# Altium schematic symbol library IoT_SYNTHPATCH.SchLib: 40 symbols
Pins are listed as number, name and electrical type; pins without a type are passive.

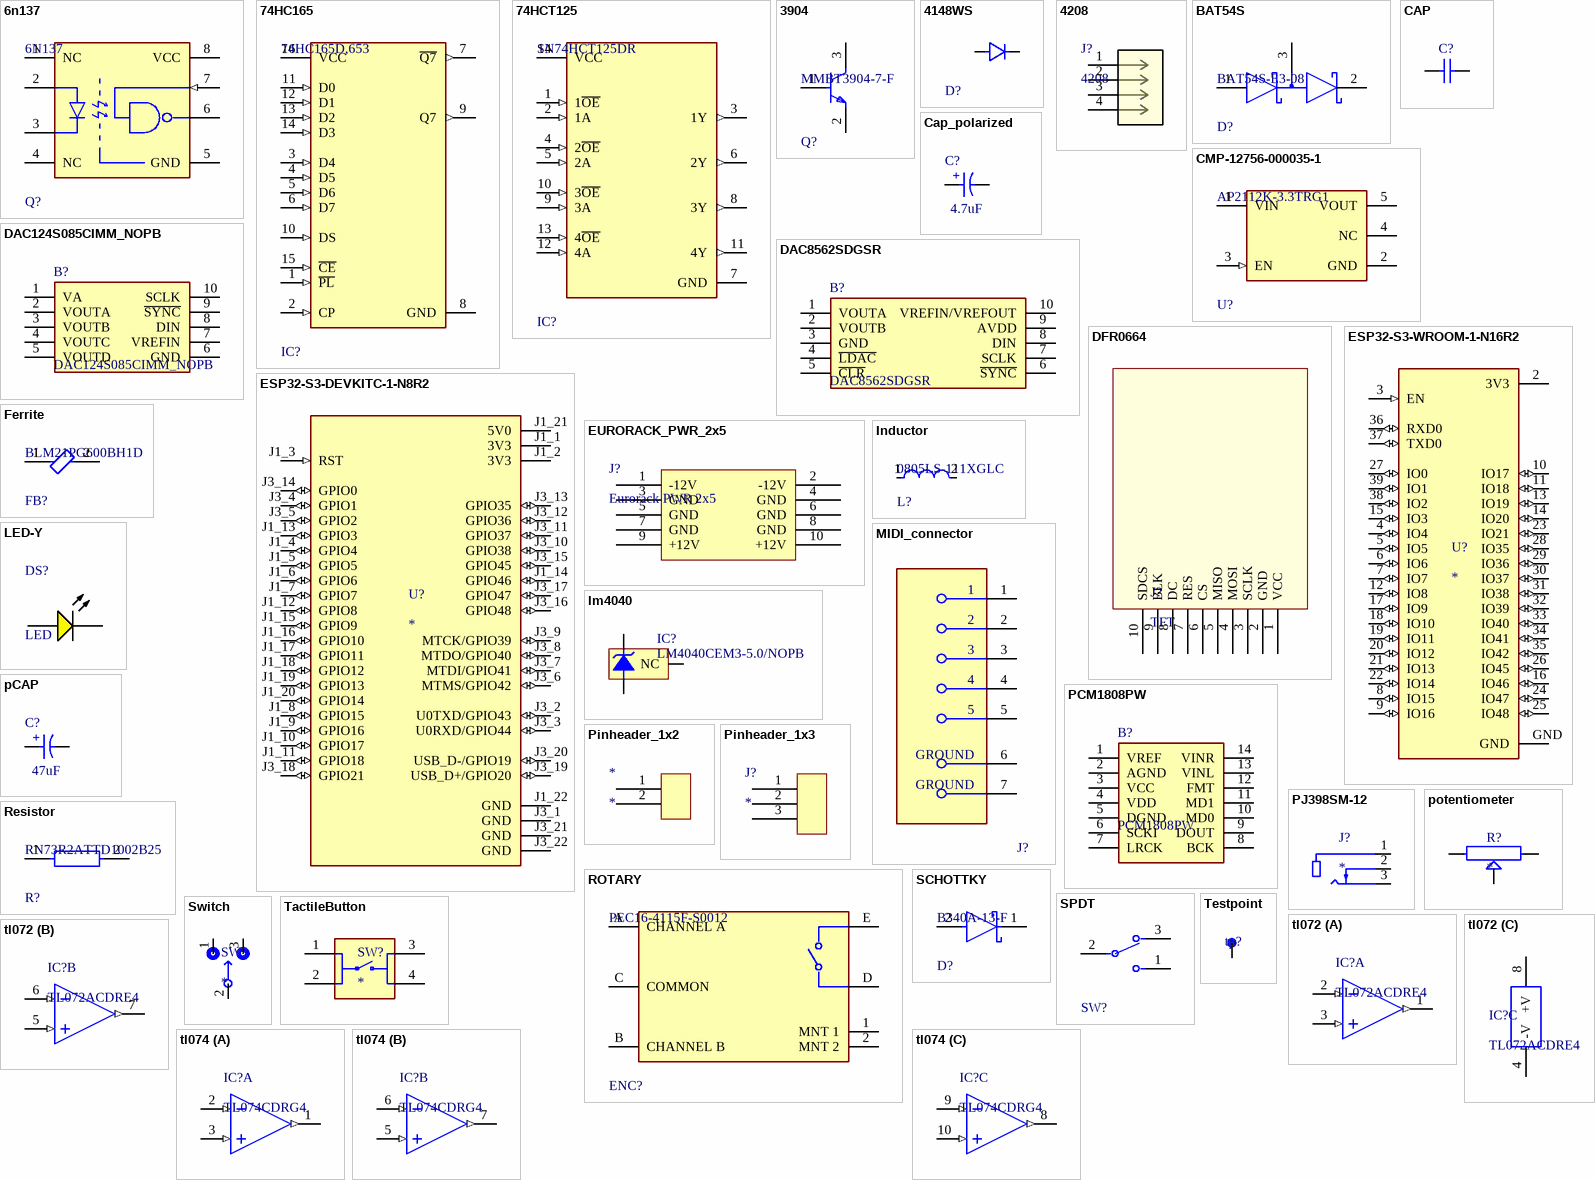
[diagram p0: symbols 6n137 to tl074]

## 6n137
designator Q?, comment 6N137
OPTOISO 3.75KV OPN COLL 8DIP GW; Manufacturer: Broadcom; Manufacturer Part Number: 6N137-300E; Min Supply Voltage: 4.5V; Forward Voltage: 1.5V; Turn Off Delay Time: 50ns; Standoff Height: 0.505mm; Reverse Voltage: 5V; Isolation Voltage: 3750Vrms; Forward Current: 10mA; Turn On Delay Time: 48ns; Max Supply Voltage: 5.5V; Package: 0; Automotive: No; Lead Free: Yes; ComponentLink2Description: Datasheet; Temperature: -40°C to +85°C; Device Class L3: unset; Height: 4.455mm; Ambient Temperature Range Low: -40°C; Digikey Description: OPTOISO 3.75KV OPN COLL 8DIP GW; Temperature Range Low: -40°C; ComponentLink2URL: https://docs.broadcom.com/docs/AV02-0940EN; Mouser Description: High Speed Optocouplers 10 Mb/s 3750Vrms; Category: Trans; Ambient Temperature Range High: +85°C; RoHS: TRUE; Octopart: https://octopart.com/6n137-300e-broadcom-71125550; Device Class L1: Optoelectronics; Device Class L2: Optocouplers; Temperature Range High: +85°C
footprint FP-6N137-300E-MFG
footprint 6n137
pins: 1 NC, 2 A, 3 C, 4 NC, 5 GND (power), 6 VO (oc), 7 VE (in), 8 VCC (power)

## 74HC165
designator IC?, comment 74HC165D,653
IC SHIFT REGST 8BIT PI-SO 16SOIC; Manufacturer: Nexperia; Standoff Height: 0.1mm; Number Of Inputs: 8; Logic Function Desc: Shift Register; Nominal Supply Current: 8uA; Number Of Circuits: 1; Propagation Delay: 15ns; Min Supply Voltage: 2V; Frequency: 61MHz; Max Supply Voltage: 6V; Height: 1.75mm; Digikey Description: IC SHIFT REGST 8BIT PI-SO 16SOIC; ComponentLink2URL: https://assets.nexperia.com/documents/data-sheet/74HC_HCT165.pdf; Ipc Land Pattern Name: SOP127P600X175-16; Temperature Range High: +125°C; Manufacturer Part Number: 74HC165D,653; Temperature: -40°C to +125°C; Device Class L2: Logic ICs; Device Class L1: Integrated Circuits (ICs); Lead Free: Yes; Number Of Outputs: 1; Ambient Temperature Range High: +125°C; ComponentLink2Description: Datasheet; Temperature Range Low: -40°C; Category: IC; RoHS: TRUE; Automotive: No; Device Class L3: Shift Registers; Octopart: https://octopart.com/74hc165d%2C653-nexperia-78737091; Footprint Url: https://assets.nexperia.com/documents/outline-drawing/SOT109-1.pdf; Ambient Temperature Range Low: -40°C; Package: SOT109-1
footprint FP-SOT109-1-MFG
footprint FP-SOT109-1-IPC_A
footprint FP-SOT109-1-IPC_C
footprint FP-SOT109-1-IPC_B
pins: 1 ~{PL} (in), 2 CP (in), 3 D4 (in), 4 D5 (in), 5 D6 (in), 6 D7 (in), 7 ~{Q7} (out), 8 GND (power), 9 Q7 (out), 10 DS (in), 11 D0 (in), 12 D1 (in), 13 D2 (in), 14 D3 (in), 15 ~{CE} (in), 16 VCC (power)

## 74HCT125
designator IC?, comment SN74HCT125DR
IC BUF NON-INVERT 5.5V 14SOIC; Number of Input Lines: 4; Polarity: Non-Inverting; Logic Function: Buffer; Low Level Output Current: 6mA; Operating Supply Voltage: 5V; Min Supply Voltage: 4.5V; Quiescent Current: 8uA; Propagation Delay: 50ns; Number of Bits per Element: 1; High Level Output Current: -6mA; Turn-On Delay Time: 36ns; Width: 3.91mm; Max Supply Voltage: 5.5V; Number of Circuits: 4; Max Operating Temperature: 85°C; Radiation Hardening: No; Number of Outputs: 4; Case/Package: SOIC; Length: 8.65mm; Number of Output Lines: 4; Number of Pins: 14; Package Quantity: 2500; Number of Inputs: 4; Mount: Surface Mount; Min Operating Temperature: -40°C; Number of Bits: 4; REACH SVHC: No SVHC; Height: 1.58mm; Contact Plating: Gold; Lead Free: Lead Free; Number of Channels: 4; Number of Elements: 4; Packaging: Tape and Reel; RoHS Compliant: Yes
footprint FP-D0014A-IPC_B
footprint FP-D0014A-IPC_C
footprint FP-D0014A-MFG
footprint FP-D0014A-IPC_A
pins: 1 1~{OE} (in), 2 1A (in), 3 1Y (out), 4 2~{OE} (in), 5 2A (in), 6 2Y (out), 7 GND (power), 8 3Y (out), 9 3A (in), 10 3~{OE} (in), 11 4Y (out), 12 4A (in), 13 4~{OE} (in), 14 VCC (power)

## 3904
designator Q?, comment MMBT3904-7-F
TRANS NPN 40V 0.2A SMD SOT23-3; Frequency: 300MHz; Power Dissipation: 350mW; Element Configuration: Single; Max Power Dissipation: 300mW; Max Collector Current: 200mA; Collector Emitter Saturation Voltage: 300mV; Number of Elements: 1; hFE Min: 100; Collector Base Voltage (VCBO): 60V; Emitter Base Voltage (VEBO): 6V; Contact Plating: Tin; Package Quantity: 3000; Max Frequency: 300MHz; REACH SVHC: No SVHC; Max Operating Temperature: 150°C; Width: 1.4mm; Collector Emitter Voltage (VCEO): 40V; Voltage Rating (DC): 40V; Radiation Hardening: No; Case/Package: SOT-23; Height: 1mm; Collector Emitter Breakdown Voltage: 40V; Length: 3.05mm; Polarity: NPN; Packaging: Tape and Reel; Number of Pins: 3; Min Operating Temperature: -55°C; Gain Bandwidth Product: 300MHz; Mount: Surface Mount; Weight: 0.000282oz; Continuous Collector Current: 200mA; Transition Frequency: 300MHz; Max Breakdown Voltage: 40V; Lead Free: Lead Free
footprint FP-SOT23-MFG
footprint FP-SOT23-IPC_B
footprint FP-SOT23-IPC_C
footprint 3904-SOT23
footprint 3904-SOT23
pins: 1 B, 2 E, 3 C

## 4148WS
designator D?, comment 1N4148WS  (value not drawn)
DIODE GEN PURP 75V 150MA SOD323F; Forward Voltage: 1V; Power Dissipation: 200mW; Element Configuration: Single; Max Forward Surge Current (Ifsm): 2A; Peak Reverse Current: 5uA; Recovery Time: 4ns; Package Quantity: 1; Number of Pins: 2; Height: 1mm; REACH SVHC: No SVHC; Max Reverse Voltage (DC): 75V; Forward Current: 150mA; Length: 1.8mm; Max Repetitive Reverse Voltage (Vrrm): 75V; Max Operating Temperature: 150°C; Average Rectified Current: 150mA; Contact Plating: Tin; Packaging: Tape and Reel; Radiation Hardening: No; Min Operating Temperature: -55°C; Width: 1.35mm; Weight: 0.0276g; Lead Free: Lead Free; Mount: Surface Mount; Reverse Voltage: 75V; Reverse Recovery Time: 4ns
footprint FP-477AB-IPC_A
footprint FP-477AB-IPC_B
footprint 4148
pins: 1 C, 2 A

## 4208
designator J?
Description; Manufacturer_Name: Adafruit Industries; Copyright: Copyright (C) 2025 Ultra Librarian. All rights reserved.; Manufacturer_Part_Number: 4208; RefDes: RefDes; Type: Type
footprint CONN_CCSH-W10R-04TR-BK-A_ADA
pins: 1, 2, 3, 4

## BAT54S
designator D?, comment BAT54S-E3-08
DIODE ARRAY SCHOTTKY 30V SOT23; Manufacturer: Vishay; Capacitance: 10pF; Forward Current: 200mA; Max Junction Temp: +125°C; Value: 10pF; Max Surge Forward Current: 600mA; Peak Reverse Current: 2uA; Temperature: -55°C to +125°C; Device Class L1: Discrete Semiconductors; Height: 1.15mm; ComponentLink2Description: Datasheet; Mouser Description: Schottky Diodes & Rectifiers 200mA 30 Volt; Max Repetitive Reverse Voltage: 30V; Manufacturer Part Number: BAT54S-E3-08; Package: 6.541-5014.01-4; Temperature Range High: +125°C; Digikey Description: DIODE ARRAY SCHOTTKY 30V SOT23; Device Class L2: Diodes; ComponentLink2URL: http://www.vishay.com/docs/85508/bat54.pdf; RoHS: TRUE; Octopart: https://octopart.com/bat54s-e3-08-vishay-29186616; Automotive: No; Lead Free: Yes; Category: Diode; Temperature Range Low: -55°C; Device Class L3: Schottky Diodes
footprint FP-6_541-5014_01-4-IPC_B
footprint FP-6_541-5014_01-4-MFG
footprint FP-6_541-5014_01-4-IPC_A
footprint FP-6_541-5014_01-4-IPC_C
pins: 1, 2, 3

## CAP
designator C?, comment VJ0805Y682KXAMT  (value not drawn)
Manufacturer: Vitramon; Part Number: VJ0805Y682KXAMT
footprint CAPC2013X145X48NL20T23 (Chip Capacitor, 2-Leads, Body 2.00x1.25mm, IPC Medium Density)
footprint CAPC2013X145X48LL20T23 (Chip Capacitor, 2-Leads, Body 2.00x1.25mm, IPC High Density)
footprint CAPC2013X145X48ML20T23 (Chip Capacitor, 2-Leads, Body 2.00x1.25mm, IPC Low Density)
pins: 1, 2
1 alternate drawing of the same symbol

## Cap_polarized
designator C?, comment 4.7uF
WCAP-ASLI Aluminum Electrolytic Capacitors; Ripple Current: 80mA; Voltage Rating (DC): 16V; Impedance: 2.2Ω; Tolerance: 20%; ESR (Equivalent Series Resistance): 1.66693Ω; Polarity: Polar; Leakage Current: 3µA; Capacitance: 10µF; Life (Hours): 2000hours; Insulation Resistance: 5.33333MΩ; Mount: Surface Mount; RoHS: Compliant; Ripple Current (AC): 80mA; REACH SVHC: Unknown; Lead Free: Lead Free; Max Operating Temperature: 105°C; Case/Package: Radial; Diameter: 4mm; Min Operating Temperature: -55°C; Length: 5.5mm; Width: 4.3mm; Height - Seated (Max): 5.5118mm; Voltage Rating: 16V; Height: 5.5mm
footprint WCAP-ASLI_D4H5.5 (Aluminium Electrolytic V-Chip SMT Capacitors, 4x5.5mm)
footprint 4148
pins: 1 P, 2 N
text: +

## CMP-12756-000035-1
designator U?, comment AP2112K-3.3TRG1
IC REG LINEAR 3.3V 600MA SOT25; Number of Regulators: 1; Output Type: Fixed; Polarity: Positive; Min Input Voltage: 2.5V; Max Input Voltage: 6V; Accuracy: 1.5%; Quiescent Current: 55uA; Dropout Voltage: 250mV; Min Operating Temperature: -40°C; Length: 3.1mm; Output Current: 600mA; Max Operating Temperature: 85°C; Package Quantity: 1; Output Voltage: 3.3V; Width: 1.7mm; Number of Outputs: 1; Packaging: Tape and Reel; Height: 1.3mm; Lead Free: Lead Free; Max Output Current: 600mA; Case/Package: SOT-23-5; Mount: Surface Mount; Number of Pins: 5
footprint FP-SOT25-IPC_C
footprint FP-SOT25-IPC_B
footprint FP-SOT25-IPC_A
footprint FP-SOT25-MFG
pins: 1 VIN (power), 2 GND (power), 3 EN (in), 4 NC, 5 VOUT (power)

## DAC124S085CIMM_NOPB
designator B?
12-Bit Micro Power QUAD Digital-to-Analog Converter with Rail-to-Rail Output; Manufacturer_Name: Texas Instruments; Manufacturer_Part_Number: DAC124S085CIMM/NOPB; Geometry.Height: 1.1mm; Mouser Part Number: 926-DAC124S085CIMMNO; Mouser Price/Stock: https://www.mouser.co.uk/ProductDetail/Texas-Instruments/DAC124S085CIMM-NOPB?qs=7X5t%252BdzoRHBv34DgWfHrUA%3D%3D; Datasheet Link: http://www.ti.com/lit/gpn/dac124s085
footprint SOP50P490X110-10N
pins: 1 VA, 2 VOUTA, 3 VOUTB, 4 VOUTC, 5 VOUTD, 6 GND, 7 VREFIN, 8 DIN, 9 ~{SYNC}, 10 SCLK

## DAC8562SDGSR
designator B?
16-bit, dual-channel, low-power, ultra-low glitch, voltage output DAC with 2.5V, 4ppm/C reference; Manufacturer_Name: Texas Instruments; Geometry.Height: 1.1mm; Mouser Part Number: 595-DAC8562SDGSR; Mouser Price/Stock: https://www.mouser.co.uk/ProductDetail/Texas-Instruments/DAC8562SDGSR?qs=L4ss%2FyqpMWQjhHzbOFnTNg%3D%3D; Manufacturer_Part_Number: DAC8562SDGSR; Datasheet Link: http://www.ti.com/lit/gpn/dac8562
footprint SOP50P490X110-10N
pins: 1 VOUTA, 2 VOUTB, 3 GND, 4 ~{LDAC}, 5 ~{CLR}, 6 ~{SYNC}, 7 SCLK, 8 DIN, 9 AVDD, 10 VREFIN/VREFOUT

## DFR0664
designator J?, comment TFT
footprint DFR0664_TFT_1x10_P2.54_M2 (DFRobot DFR0664 2.0in TFT: 1x10 header 2.54mm (pin1=VCC), 4x M2 holes 31.7x56mm, board 35.7x60mm. Verify against module before ordering.)
pins: 1 VCC, 2 GND, 3 SCLK, 4 MOSI, 5 MISO, 6 CS, 7 RES, 8 DC, 9 BLK, 10 SDCS

## ESP32-S3-DEVKITC-1-N8R2
designator U?
WiFi Development Tools - 802.11 (Engineering Samples Only) ESP32-S3 General-Purpose Development Board, ESP32-S3-WROOM-1-N8R2, with Pin Header; MF: Espressif Systems; MP: ESP32-S3-DEVKITC-1-N8R2; SnapEDA_Link: https://www.snapeda.com/parts/ESP32-S3-DEVKITC-1-N8R2/Espressif+Systems/view-part/?ref=snap; Package: None; Value: *; Check_prices: https://www.snapeda.com/parts/ESP32-S3-DEVKITC-1-N8R2/Espressif+Systems/view-part/?ref=eda
footprint XCVR_ESP32-S3-DEVKITC-1-N8R2
pins: J1_1 3V3 (power), J1_2 3V3 (power), J1_3 RST (in), J1_4 GPIO4 (io), J1_5 GPIO5 (io), J1_6 GPIO6 (io), J1_7 GPIO7 (io), J1_8 GPIO15 (io), J1_9 GPIO16 (io), J1_10 GPIO17 (io), J1_11 GPIO18 (io), J1_12 GPIO8 (io), J1_13 GPIO3 (io), J1_14 GPIO46 (io), J1_15 GPIO9 (io), J1_16 GPIO10 (io), J1_17 GPIO11 (io), J1_18 GPIO12 (io), J1_19 GPIO13 (io), J1_20 GPIO14 (io), J1_21 5V0 (power), J1_22 GND (power), J3_1 GND (power), J3_2 U0TXD/GPIO43 (io), J3_3 U0RXD/GPIO44 (io), J3_4 GPIO1 (io), J3_5 GPIO2 (io), J3_6 MTMS/GPIO42 (io), J3_7 MTDI/GPIO41 (io), J3_8 MTDO/GPIO40 (io), J3_9 MTCK/GPIO39 (io), J3_10 GPIO38 (io), J3_11 GPIO37 (io), J3_12 GPIO36 (io), J3_13 GPIO35 (io), J3_14 GPIO0 (io), J3_15 GPIO45 (io), J3_16 GPIO48 (io), J3_17 GPIO47 (io), J3_18 GPIO21 (io), J3_19 USB_D+/GPIO20 (io), J3_20 USB_D-/GPIO19 (io), J3_21 GND (power), J3_22 GND (power)

## ESP32-S3-WROOM-1-N16R2
designator U?
Bluetooth, WiFi 802.11b/g/n, Bluetooth v5.0 Transceiver Module 2.4GHz PCB Trace Surface Mount; MF: Espressif Systems; MP: ESP32S3WROOM1N16R2; SnapEDA_Link: https://www.snapeda.com/parts/ESP32S3WROOM1N16R2/Espressif+Systems/view-part/?ref=snap; Package: NON STANDARD Espressif Systems; Value: *; Check_prices: https://www.snapeda.com/parts/ESP32S3WROOM1N16R2/Espressif+Systems/view-part/?ref=eda
footprint XCVR_ESP32-S3-WROOM-1-N16R2
pins: 2 3V3 (power), 3 EN (in), 4 IO4 (io), 5 IO5 (io), 6 IO6 (io), 7 IO7 (io), 8 IO15 (io), 9 IO16 (io), 10 IO17 (io), 11 IO18 (io), 12 IO8 (io), 13 IO19 (io), 14 IO20 (io), 15 IO3 (io), 16 IO46 (io), 17 IO9 (io), 18 IO10 (io), 19 IO11 (io), 20 IO12 (io), 21 IO13 (io), 22 IO14 (io), 23 IO21 (io), 24 IO47 (io), 25 IO48 (io), 26 IO45 (io), 27 IO0 (io), 28 IO35 (io), 29 IO36 (io), 30 IO37 (io), 31 IO38 (io), 32 IO39 (io), 33 IO40 (io), 34 IO41 (io), 35 IO42 (io), 36 RXD0 (io), 37 TXD0 (io), 38 IO2 (io), 39 IO1 (io), GND (power)

## EURORACK_PWR_2x5
designator J?, comment Eurorack PWR 2x5
Eurorack power header 2x5 shrouded. Pin 1-2 -12V (red stripe), 3-8 GND, 9-10 +12V
footprint EURORACK_PWR_2x5_P2.54_SHROUDED (Eurorack power header 2x5 2.54mm shrouded, pin1 = -12V (red stripe))
pins: 1 -12V, 2 -12V, 3 GND, 4 GND, 5 GND, 6 GND, 7 GND, 8 GND, 9 +12V, 10 +12V

## Ferrite
designator FB?, comment BLM21PG600BH1D
Chip Ferrite Bead, 0805, 60Ω @ 100MHz, 0.02Ω, 25%, 1.9A; RoHS Compliant: No
footprint FP-BLM21-0_2-t0_85-e0_5-IPC_C
footprint FP-BLM21-0_2-t0_85-e0_5-IPC_B
footprint FP-BLM21-0_2-t0_85-e0_5-IPC_A
footprint FP-BLM21-0_2-t0_85-e0_5-MFG
footprint 0805-hs
pins: 1, 2

## Inductor
designator L?, comment 0805LS-111XGLC
0805LS-111XGLC RF inductor, ferrite core, 2% tol, SMT, RoHS; NexarPartId: 6751235; DC Resistance (DCR): 50mΩ; Max DC Current: 2A; Self Resonant Frequency: 1.2GHz; Inductance: 110nH; Test Frequency: 7.9MHz; Q Factor: 19; Core Material: Ceramic, Ferrite; Length: 2.29mm; Termination: SMD/SMT; Weight: 5.499807mg; RoHS: Compliant; Tolerance: 2%; Ambient Temperature Range High: 85°C; RMS Current (Irms): 2A; Height: 1.6mm; Lifecycle Status: Production; Case/Package: 0805; Series Resistance: 50mΩ; Min Operating Temperature: -40°C; Composition: Wirewound; Max Operating Temperature: 85°C; Lead Free: Contains Lead; Width: 1.91mm
footprint FP-0805LS-MFG
pins: 1, 2

## LED-Y
designator DS?, comment LED
Through Hole Lamp, 2.1 V, -55 to 100 degC, 2-Pin THD, RoHS, Bulk; Luminous Intensity: 200 mcd; Illumination Colour: White; Power Rating: 78 mW; Viewing Angle: 140 degrees; Lens Style: Diffused; Nominal Vf: 3.6 V; Case\Package: 0603; Forward Current: 20 mA; Colour: White; Pins: 2; Mount: Surface Mount; Min Operating Temperature: -40 degC; Radiation Hardening: No; Width: 0.8 mm; PackageDescription: 2-Pin Through Hole Device, Dia 3.8 mm, Pitch 2.54 mm; REACH SVHC: No SVHC; DatasheetVersion: Rev. B, 07/2013; Max Operating Temperature: 85 degC; PackageReference: LTL-1CHYE; ComponentLink2URL: https://datasheet.ciiva.com/4269/s-110-ltl-1chye-4269126.pdf; ComponentLink1URL: http://www.us.liteon.com/; Case Code (Imperial): 0603; Height: 0.6 mm; Packaging: Tape and Reel; ComponentLink2Description: Datasheet; Length: 1.6 mm; Package Quantity: 4000; RoHSCompliant: true; ComponentLink1Description: Manufacturer URL; Case Code (Metric): 1608; Forward Voltage: 3.6 V
footprint LTST-LTL-1CHYE (THD, 2-Leads, Dia 3.8mm, Pitch 2.54mm)
footprint LED_SSL-LX4673GD-LA20
pins: 1 A, 2 K

## lm4040
designator IC?, comment LM4040CEM3-5.0/NOPB
Precision Micropower Shunt Voltage Reference, 3-pin SOT-23, Pb-Free; Manufacturer: National Semiconductor; PackageTopMarking: R5C*XTT; PowerWise: N; CompType: Voltage Reference IC; ComponentLink1URL: http://www.national.com/ds/LM/LM4040.pdf; PinCount: 3; ComponentLink2Description: LM4040 Web Page; ComponentLink3URL: http://www.national.com/packaging/folders/mf03a.html; RevisionNote: Component URLs added; PackageVersion: revB, Mar-2003; ComponentLink2URL: http://www.national.com/pf/LM/LM4040.html; ComponentLink3Description: MF03A Package Page; PackageReference: MF03A; RoHS: Y; DatasheetVersion: Apr-2005; PackageDescription: Molded SOT-23, .115 x .051 x .037in Body, 3 Lead, .075 in Pitch; ComponentLink1Description: LM4040 Datasheet
footprint MF03A_L (SOT23, 3-Leads, Body 2.9x1.3mm, Pitch 0.95mm, Lead Span 2.4mm, IPC High Density)
footprint MF03A_M (SOT23, 3-Leads, Body 2.9x1.3mm, Pitch 0.95mm, Lead Span 2.4mm, IPC Low Density)
footprint MF03A_N (SOT23, 3-Leads, Body 2.9x1.3mm, Pitch 0.95mm, Lead Span 2.4mm, IPC Medium Density)
pins: 1 +V, 2 -V, 3 NC

## MIDI_connector
designator J?, comment 57PC5F  (value not drawn)
CONN RCPT FMALE DIN 5POS SOLDER; Number of Contacts: 5; Gender: Female; Current Rating: 3A; Voltage Rating: 34V; Strain Relief: No (Without); Number of Ports: 1; Connector Type: Receptacle; Body Material: Metal; RoHS Compliant: Yes; Radiation Hardening: No; Package Quantity: 1; Case/Package: Metal; Insulation Material: Plastic; Number of Terminals/Pins: 5; Packaging: Bulk; Contact Type: Pin; Series: -; Mount: Through Hole; Contact Plating: Nickel; Termination: Solder; Number of Positions: 5; Orientation: Right Angle; Lead Free: Lead Free; Color: Black; Fastening Type: Pull
footprint FP-57PC5F-MFG
pins: 1, 2, 3, 4, 5, 6 GROUND (power), 7 GROUND (power)

## pCAP
designator C?, comment 47uF
WCAP-ASLI Aluminum Electrolytic Capacitors; Ripple Current: 80mA; Voltage Rating (DC): 16V; Impedance: 2.2Ω; Tolerance: 20%; ESR (Equivalent Series Resistance): 1.66693Ω; Polarity: Polar; Leakage Current: 3µA; Capacitance: 10µF; Life (Hours): 2000hours; Insulation Resistance: 5.33333MΩ; Mount: Surface Mount; RoHS: Compliant; Ripple Current (AC): 80mA; REACH SVHC: Unknown; Lead Free: Lead Free; Max Operating Temperature: 105°C; Case/Package: Radial; Diameter: 4mm; Min Operating Temperature: -55°C; Length: 5.5mm; Width: 4.3mm; Height - Seated (Max): 5.5118mm; Voltage Rating: 16V; Height: 5.5mm
footprint WCAP-ASLI_D4H5.5 (Aluminium Electrolytic V-Chip SMT Capacitors, 4x5.5mm)
pins: 1 P, 2 N
text: +

## PCM1808PW
designator B?
99dB SNR Stereo ADC With Single-Ended Inputs; Manufacturer_Name: Texas Instruments; Geometry.Height: 1.2mm; Mouser Part Number: 595-PCM1808PW; Mouser Price/Stock: https://www.mouser.co.uk/ProductDetail/Texas-Instruments/PCM1808PW?qs=iSMark9AYDWYQaMpH%2FhwPg%3D%3D; Manufacturer_Part_Number: PCM1808PW; Datasheet Link: http://www.ti.com/lit/gpn/pcm1808
footprint SOP65P640X120-14N
pins: 1 VREF, 2 AGND, 3 VCC, 4 VDD, 5 DGND, 6 SCKI, 7 LRCK, 8 BCK, 9 DOUT, 10 MD0, 11 MD1, 12 FMT, 13 VINL, 14 VINR

## Pinheader_1x2
designator *
footprint HDR_1x2_P2.54 (Pin header 1x2, 2.54 mm)
pins: 1, 2

## Pinheader_1x3
designator J?
footprint HDR_1x3_P2.54 (Pin header 1x3, 2.54 mm)
pins: 1, 2, 3

## PJ398SM-12
designator J?
3.5mm Switching Jack Socket; MP: PJ398SM-12; MF: Thonk; Availability: Not in stock; Price: None; Package: Package; Value: *
footprint THONK_PJ398SM-12
footprint THONK_PJ398SM-12
pins: 1, 2, 3

## potentiometer
designator R?
Potentiometers 9mm Linear 100K Round Shaft; MF: Alpha (Taiwan); MP: RD901F-40-15R1-B100K-00DL1; SnapEDA_Link: https://www.snapeda.com/parts/RD901F-40-15R1-B100K-00DL1/Alpha+Taiwan/view-part/?ref=snap; Package: None; Value: *; Check_prices: https://www.snapeda.com/parts/RD901F-40-15R1-B100K-00DL1/Alpha+Taiwan/view-part/?ref=eda
footprint SINGLE_POT
pins: 1, 2, 3

## Resistor
designator R?, comment RN73R2ATTD1002B25
RES 10K OHM 0.1% 1/8W 0805
footprint FP-RN73R2A-IPC_A
footprint FP-RN73R2A-MFG
footprint FP-RN73R2A-IPC_B
footprint FP-RN73R2A-IPC_C
pins: 1, 2

## ROTARY
designator ENC?, comment PEC16-4115F-S0012
ROTARY ENCODER MECHANICAL 12PPR; Pulses per Revolution: 12; Built in Switch: Yes; Output Type: Quadrature; Number of Channels: 2; Operating Supply Voltage: 5V; Min Operating Temperature: -30°C; Package Quantity: 50; Length: 23mm; Height: 17.3mm; Mount: Through Hole; Termination: PC Pin; Encoder Type: Mechanical; Max Operating Temperature: 70°C; Orientation: Vertical; RoHS Compliant: Yes; Series: PEC16; Width: 16mm; Detent: Yes
footprint FP-PEC16-4115F-S0012-MFG
pins: 1 MNT 1, 2 MNT 2, A CHANNEL A, B CHANNEL B, C COMMON, D, E

## SCHOTTKY
designator D?, comment B340A-13-F
DIODE SCHOTTKY 40V 3A SMA; Max Forward Surge Current (Ifsm): 80A; Forward Voltage: 500mV; Polarity: Standard; Max Reverse Current: 500uA; Capacitance: 250pF; Element Configuration: Single; Mount: Surface Mount; Output Current: 3A; Radiation Hardening: No; Width: 2.92mm; Current Rating: 3A; Termination: SMD/SMT; Voltage: 40V; Series: -; Max Operating Temperature: 125°C; Current: 3A; Max Repetitive Reverse Voltage (Vrrm): 40V; Min Operating Temperature: -55°C; REACH SVHC: No SVHC; Number of Pins: 2; Average Rectified Current: 3A; Contact Plating: Tin; RoHS Compliant: Yes; Max Reverse Voltage (DC): 40V; Packaging: Tape and Reel; Height: 2.3mm; Length: 4.6mm; Case/Package: SMA; Weight: 0.002258oz; Peak Non-Repetitive Surge Current: 80A; Package Quantity: 5000; Lead Free: Lead Free; Forward Current: 3A; Voltage Rating (DC): 40V
footprint FP-SMA-MFG
pins: 1 C, 2 A

## SPDT
designator SW?, comment 7101SD9CQE  (value not drawn)
7101SD9CQE Toggle Switch, Spdt, On-On, Maintained, 5A, 28Vdc, 3 Pcb Hole Cnt, Solder Terminal, Toggle; NexarPartId: 55410166; Voltage Rating (AC): 120V; Max Voltage Rating (DC): 28V; Illumination Type: Illuminated, Non-Illuminated; Contact Resistance: 10mΩ; Actuator Material: Brass, Chrome; Life (Cycles): 100kcycles; Max Voltage Rating (AC): 250V; Actuator Length: 12.45mm; Max Current Rating: 5A; Contact Current Rating: 5A; Termination: PC Pins; Min Operating Temperature: -30°C; Depth: 6.86mm; Orientation: Straight; Voltage Rating (DC): 28V; Length: 12.7mm; RoHS: Compliant; Housing Material: Stainless Steel; Contact Material: Silver; Contact Plating: Silver; Radiation Hardening: No; Current Rating: 5A; Lead Free: Lead Free; Switch Function: On-On; Mount: Through Hole; Electrical Life: 100kcycles; Throw Configuration: SPDT; Max Operating Temperature: 85°C
footprint FP-7101SD9CQE-MFG
pins: 1, 2 COMM, 3

## Switch
designator SW?
Switch Slide ON ON SPDT Side Slide 0.1A 12VDC 10000Cycles PC Pins Bracket Mount/Through Hole Bulk; MF: Littelfuse/C&K; MP: OS102011MA1QN1; SnapEDA_Link: https://www.snapeda.com/parts/OS102011MA1QN1/Littelfuse/view-part/?ref=snap; Package: None; Value: *; Check_prices: https://www.snapeda.com/parts/OS102011MA1QN1/Littelfuse/view-part/?ref=eda
footprint SWITCH_11MA1QN1
pins: 1, 2, 3

## TactileButton
designator SW?
FSM4JH=6MM TACT SWITCH, HIGH TEMP; MF: TE Connectivity; MP: 1825910-6; SnapEDA_Link: https://www.snapeda.com/parts/1825910-6/TE+Connectivity+Alcoswitch+Switches/view-part/?ref=snap; Package: None; Value: *; Check_prices: https://www.snapeda.com/parts/1825910-6/TE+Connectivity+Alcoswitch+Switches/view-part/?ref=eda
footprint SW_1825910-6-4
pins: 1, 2, 3, 4

## Testpoint
designator tp?, comment Test point  (value not drawn)
Value: Test point
footprint TP
pins: 1

## tl072
designator IC?, comment TL072ACDRE4
Low-Noise JFET-Input Operational Amplifier, 7 to 36 V, 0 to 70 degC, 8-pin SOIC (D8), Green (RoHS & no Sb/Br); Manufacturer: Texas Instruments; Vn at 1kHz(Typ)(nV/rtHz): 18; Slew Rate(Typ)(V/us): 13; Rating: Catalog; CMRR(Min)(dB): 75; Total Supply Voltage(Max)(+5V is 5, +/-5V is 10): 36; GBW(Typ)(MHz): 3; Sub Family: General Purpose Amplifier, High Supply Voltage Amplifier (>=30V); Vio (25C)(Max)(mV): 6; Total Supply Voltage(Min)(+5V is 5, +/-5V is 10): 7; Iq per channel(Max)(mA): 2.5; IIB(Max)(pA): 200; Number of Channels: 2; ComponentLink1Description: Manufacturer URL; DatasheetVersion: SLOS080J; ComponentLink1URL: http://www.ti.com/; Eco-Plan: Green (RoHS & no Sb/Br); PackageDescription: 8-Pin Plastic Small Outline, Body 4.9 x 3.9 mm, Pitch 1.27 mm; PackageVersion: 4040047-3/M, 06/2011; Offset Drift(Typ)(uV/C): 18; Mounting Technology: Surface Mount; PackageReference: D8; ComponentLink2Description: Datasheet; ComponentLink3URL: http://www.ti.com/litv/pdf/msoi002j; Code_JEDEC: MS-012; ComponentLink3Description: Package Specification; ComponentLink2URL: http://www.ti.com/lit/ds/symlink/tl072a.pdf; PartNumber: TL072ACDRE4
footprint TI-D8_N (SOIC, 8-Leads, Body 4.9x3.9mm, Pitch 1.27mm, IPC Medium Density)
footprint TI-D8_L (SOIC, 8-Leads, Body 4.9x3.9mm, Pitch 1.27mm, IPC High Density)
footprint TI-D8_M (SOIC, 8-Leads, Body 4.9x3.9mm, Pitch 1.27mm, IPC Low Density)
footprint SOP08
footprint tl072
part A pins: 1 OUT1 (out), 2 IN1- (in), 3 IN1+ (in)
part B pins: 5 IN2+ (in), 6 IN2- (in), 7 OUT2 (out)
part C pins: 4 -V (power), 8 +V (power)

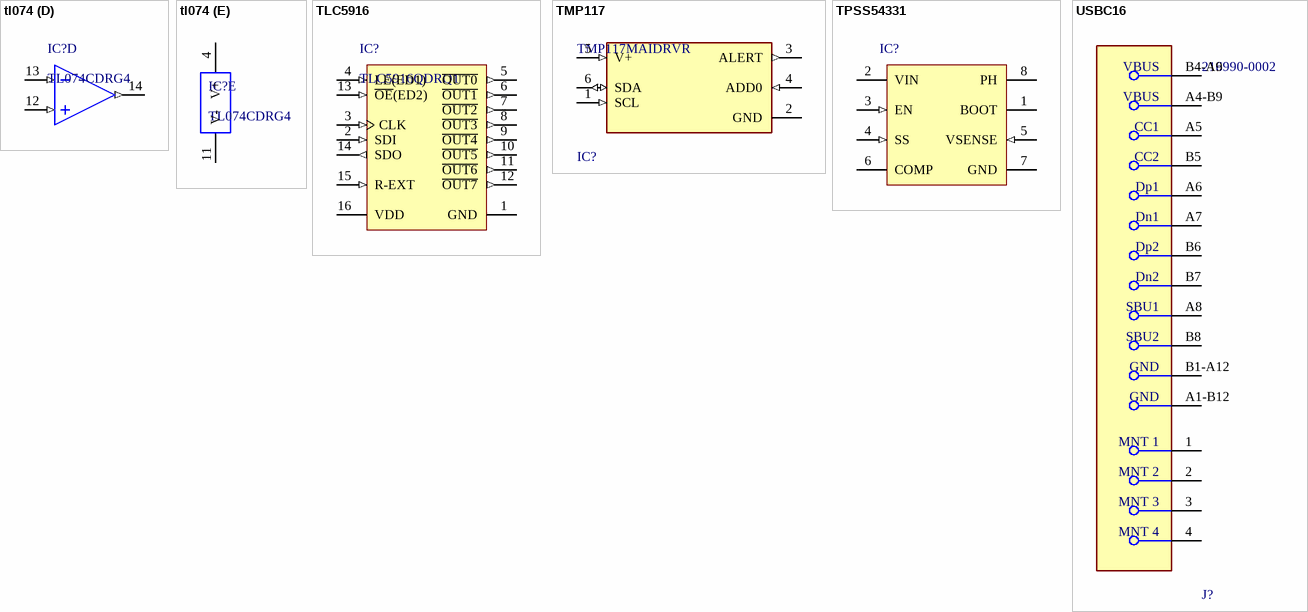
[diagram p1: symbols tl074 to USBC16]

## tl074
designator IC?, comment TL074CDRG4
Quad Low-Noise JFET-Input General-Purpose Operational Amplifier, 7 to 36 V, 0 to 70 degC, 14-pin SOIC (D14), Green (RoHS & no Sb/Br); Manufacturer: Texas Instruments; GBW(Typ)(MHz): 3; Sub Family: General Purpose Amplifier, High Supply Voltage Amplifier (>=30V); Vn at 1kHz(Typ)(nV/rtHz): 18; Rating: Military; Total Supply Voltage(Min)(+5V is 5, +/-5V is 10): 7; IIB(Max)(pA): 200; CMRR(Min)(dB): 70; Number of Channels: 4; Vio (25C)(Max)(mV): 10; Slew Rate(Typ)(V/us): 13; Iq per channel(Max)(mA): 2.5; Total Supply Voltage(Max)(+5V is 5, +/-5V is 10): 36; ComponentLink2URL: http://www.ti.com/lit/ds/symlink/tl074.pdf; ComponentLink3Description: Package Specification; PackageReference: D0014A; ComponentLink1URL: http://www.ti.com/; PartNumber: TL074CDRG4; PackageVersion: 4040047-5/M, 06/2011; Eco-Plan: Green (RoHS & no Sb/Br); PackageDescription: 14-Pin Plastic Small Outline, Body 8.65 x 3.90 mm, Pitch 1.27 mm; Mounting Technology: Surface Mount; ComponentLink1Description: Manufacturer URL; Offset Drift(Typ)(uV/C): 18; ComponentLink3URL: http://www.ti.com/lit/ml/mpds177g/mpds177g.pdf; ComponentLink2Description: Datasheet; DatasheetVersion: SLOS080J; Code_JEDEC: MS-012
footprint D0014A_L (SOIC, 14-Leads, Body 8.75x4mm, Pitch 1.27mm, IPC High Density)
footprint D0014A_N (SOIC, 14-Leads, Body 8.75x4mm, Pitch 1.27mm, IPC Medium Density)
footprint D0014A_M (SOIC, 14-Leads, Body 8.75x4mm, Pitch 1.27mm, IPC Low Density)
footprint tl074 (SOIC, 14-Leads, Body 8.75x4mm, Pitch 1.27mm, IPC Low Density)
part A pins: 1 OUT1 (out), 2 IN1- (in), 3 IN1+ (in)
part B pins: 5 IN2+ (in), 6 IN2- (in), 7 OUT2 (out)
part C pins: 8 OUT3 (out), 9 IN3- (in), 10 IN3+ (in)
part D pins: 12 IN4+ (in), 13 IN4- (in), 14 OUT4 (out)
part E pins: 4 V+ (power), 11 V- (power)

## TLC5916
designator IC?, comment TLC5916QDRQ1
Automotive Catalog 8-Bit Constant-Current LED Sink Drivers, 3 to 5.5 V, -40 to 125 degC, 16-pin SOIC (D16), Green (RoHS & no Sb/Br); Manufacturer: Texas Instruments; SubFamily: LED Driver; Vin(Max)(V): 5.5; Vin(Min)(V): 3; Iout(Max)(A): 0.12; DatasheetVersion: SLVS814; Mounting Technology: Surface Mount; ComponentLink3Description: Package Specification; PartNumber: TLC5916QDRQ1; ComponentLink1Description: Manufacturer URL; Eco-Plan: Green (RoHS & no Sb/Br); Code_JEDEC: MS-012; ComponentLink2URL: http://www.ti.com/general/docs/lit/getliterature.tsp?genericPartNumber=TLC5916-Q1&fileType=pdf; PackageDescription: 16-Pin Plastic Small Outline, Body 9.90 x 3.90 mm, Pitch 1.27 mm; ComponentLink2Description: Datasheet; ComponentLink3URL: http://www.ti.com/litv/pdf/mpds178g; ComponentLink1URL: http://www.ti.com/; PackageVersion: 4040047-6/M; PackageReference: D0016A
footprint D0016A_N (SOIC, 16-Leads, Body 10x4mm, Pitch 1.27mm, IPC Medium Density)
footprint D0016A_L (SOIC, 16-Leads, Body 10x4mm, Pitch 1.27mm, IPC High Density)
footprint D0016A_M (SOIC, 16-Leads, Body 10x4mm, Pitch 1.27mm, IPC Low Density)
pins: 1 GND (power) "Ground for control logic and current sink", 2 SDI (in) "Serial-data input to the Shift register", 3 CLK (in) "Clock input for data shift on rising edge", 4 LE(ED1) (in) "Data strobe input Serial data is transferred to the respective latch when LE(ED1) is high. The data is latched when LE(ED1) goes low. Also, a control signal input for an Error Detection Mode and Current Adjust Mode (see (See Datasheet)", 5 ~{OUT0} (out) "Constant-current output", 6 ~{OUT1} (out) "Constant-current output", 7 ~{OUT2} (out) "Constant-current output", 8 ~{OUT3} (out) "Constant-current output", 9 ~{OUT4} (out) "Constant-current output", 10 ~{OUT5} (out) "Constant-current output", 11 ~{OUT6} (out) "Constant-current output", 12 ~{OUT7} (out) "Constant-current output", 13 ~{OE}(ED2) (in) "Output enable. When O\E\(ED2) is active (low), the output drivers are enabled; when O\E\(ED2) is high, all output drivers are turned OFF (blanked). Also, a control signal input for an Error Detection Mode and Current Adjust (See Datasheet)", 14 SDO (out) "Serial-data output to the following SDI of next driver IC or to the microcontroller", 15 R-EXT (in) "External Resistor - Connect an external resistor to ground to set the current for all outputs", 16 VDD (power) "Supply voltage"

## TMP117
designator IC?, comment TMP117MAIDRVR
TEMPERATURE SENSOR; Resolution: 16b; Output Type: I2C; Packaging: Cut Tape; Mount: Surface Mount; Min Operating Temperature: -55°C; Max Operating Temperature: 150°C; RoHS Compliant: Yes
footprint FP-DRV0006B-IPC_B
footprint FP-DRV0006B-MFG
footprint FP-DRV0006B-IPC_C
footprint FP-DRV0006B-IPC_A
pins: 1 SCL (in), 2 GND (power), 3 ALERT (out), 4 ADD0 (in), 5 V+ (in), 6 SDA (io)

## TPSS54331
designator IC?, comment TPS54331DG4  (value not drawn)
Buck Step Down Regulator with 3.5 to 28 V Input and 0.8 to 25 V Output, -40 to 150 degC, 8-Pin SOIC (D), Green (RoHS & no Sb/Br); Manufacturer: Texas Instruments; Vin(Max)(V): 28; Vout(Min)(V): 0.8; Vin(Min)(V): 3.5; Duty Cycle(Max)(%): 90; Regulated Outputs(#): 1; SubFamily: Step-Down Regulator; Iq(Typ)(mA): 0.11; Iout(Max)(A): 3; Rating: Catalog; Vout(Max)(V): 25; PackageDescription: 8-Pin Plastic Small Outline Integrated Circuit, 4.9 x 3.9 mm, Pitch 1.27 mm Pitch; ComponentLink1Description: Datasheet; DatasheetVersion: SLVS839D; PackageReference: D8; ComponentLink1URL: http://www.ti.com/general/docs/lit/getliterature.tsp?genericPartNumber=TPS54331&fileType=pdf; Code_JEDEC: MS-012AA; ComponentLink2URL: http://www.ti.com/litv/pdf/msoi002j; PartNumber: TPS54331DG4; Switch Current Limit(Typ)(A): 3.5; Mounting Technology: Surface Mount; Eco-Plan: Green (RoHS & no Sb/Br); ComponentLink3URL: Samples URL:http://www.ti.com/product/tps54331#samples; ComponentLink3Description: URL Link1; Topology: Buck; PackageVersion: revM, Jun-2011; ComponentLink2Description: Package Specification
footprint D8_N (SOIC, 8-Leads, Body 4.9x3.9mm, Pitch 1.27mm, IPC Medium Density)
footprint D8_L (SOIC, 8-Leads, Body 4.9x3.9mm, Pitch 1.27mm, IPC High Density)
footprint D8_M (SOIC, 8-Leads, Body 4.9x3.9mm, Pitch 1.27mm, IPC Low Density)
pins: 1 BOOT "A 0.1 uF bootstrap capacitor is required between BOOT and PH. If the voltage on this capacitor falls below the minimum requirement, the high-side MOSFET is forced to switch off until the capacitor is refreshed", 2 VIN (power) "Input supply voltage, 3.5 V to 28 V.", 3 EN (in) "Enable pin. Pull below 1.25V to disable. Float to enable. Programming the input undervoltage lockout with two resistors is recommended.", 4 SS (in) "Slow start pin. An external capacitor connected to this pin sets the output rise time.", 5 VSENSE (in) "Inverting node of the gm error amplifier.", 6 COMP "Error amplifier output, and input to the PWM comparator. Connect frequency compensation components to this pin.", 7 GND (power) "Ground", 8 PH (power) "The source of the internal high-side power MOSFET"

## USBC16
designator J?, comment 216990-0002
CONN RCP USB2.0 TYP C 24P SMD RA
footprint FP-216990-0002-MFG
pins: 1 MNT 1, 2 MNT 2, 3 MNT 3, 4 MNT 4, A1-B12 GND, A4-B9 VBUS, A5 CC1, A6 Dp1, A7 Dn1, A8 SBU1, B1-A12 GND, B4-A9 VBUS, B5 CC2, B6 Dp2, B7 Dn2, B8 SBU2